# Altium footprint library CircuitosIntegrados.PcbLib: 19 footprints (part 1 of 2)
Each footprint in its own frame and in the unit in brackets; x right, y up, seen from the top. Pads: shape width x height; smd on the part's side, far side on the other; paste and mask are expansions set on the pad; w line width, h text height; cw(c..) or ccw(c..) is an arc to the next point about the centre after c.
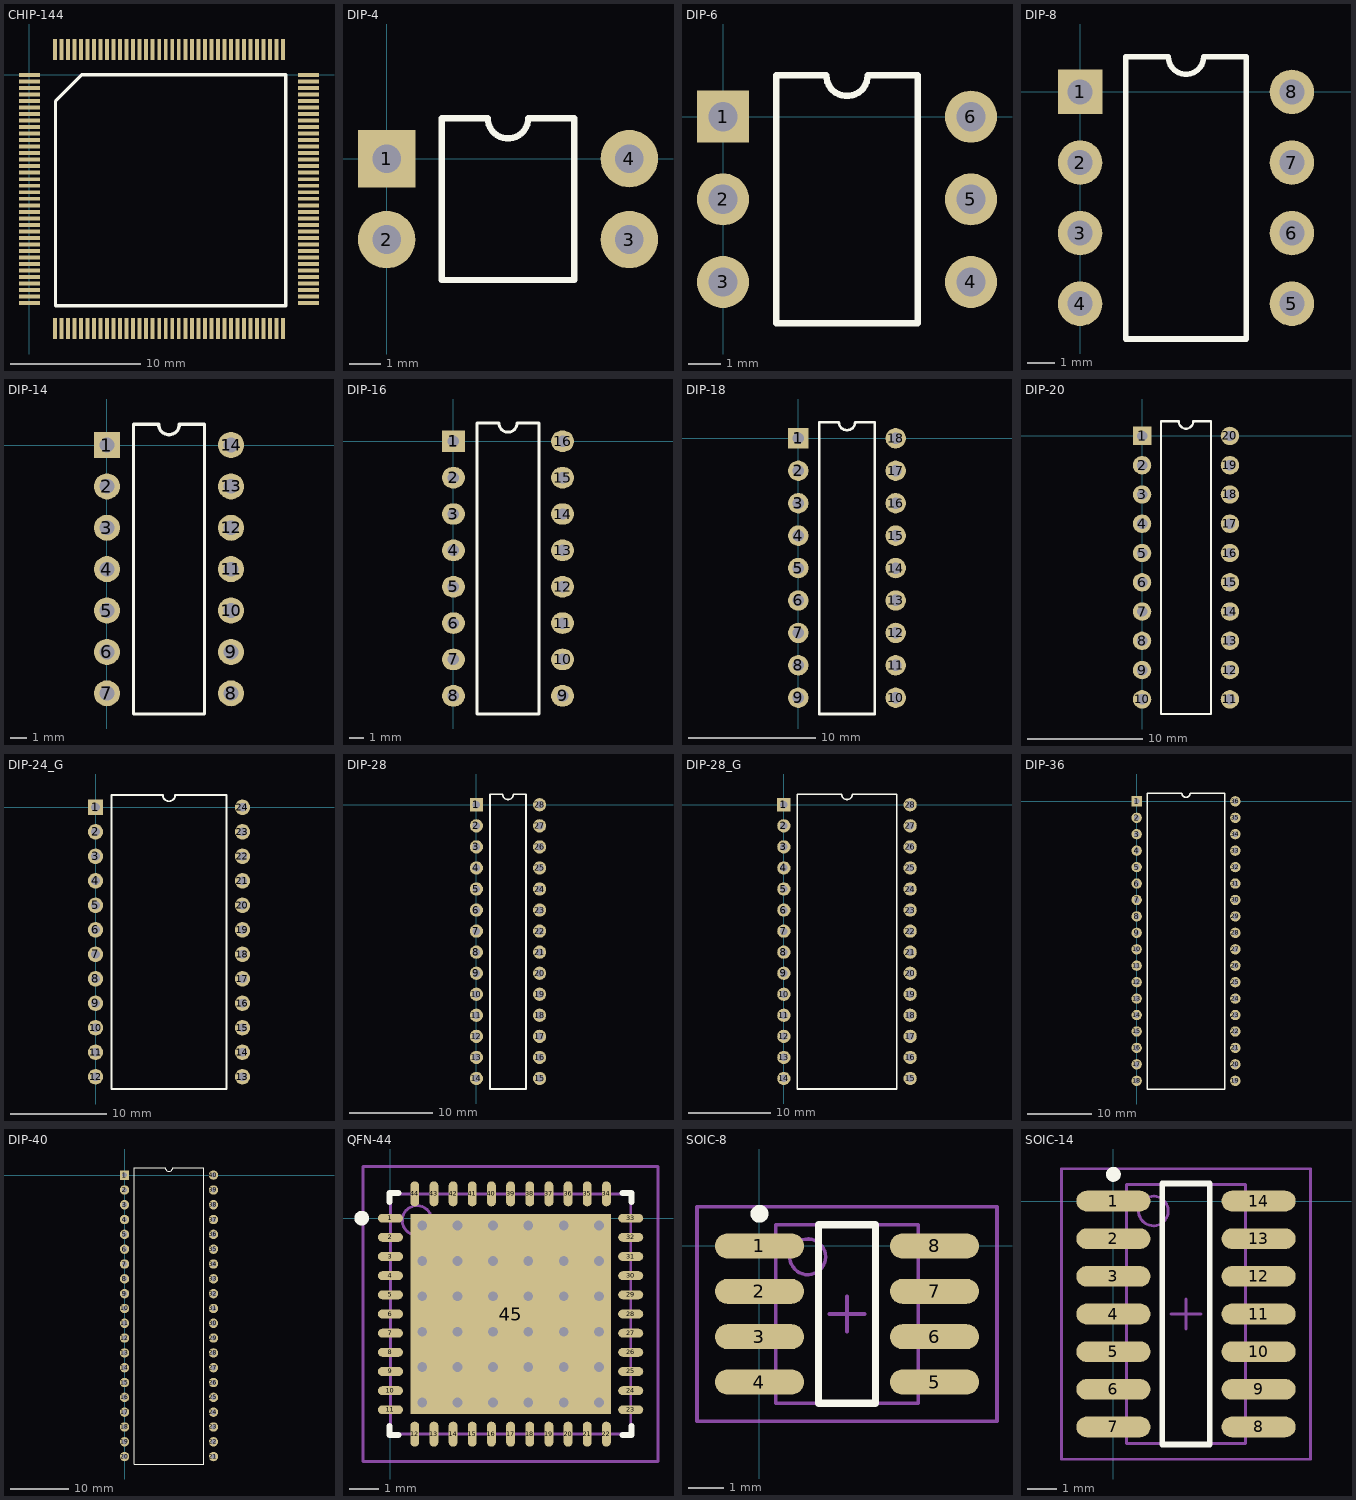
[diagram p0: the footprints below, top view; thin cyan lines are the x and y axes]

## CHIP-144 [mm]
pads (144):
  rect 1.6x0.3 smd: 1(0,0) 2(0,-0.5) 3(0,-1) 4(0,-1.5) 5(0,-2) 6(0,-2.5) 7(0,-3) 8(0,-3.5) 9(0,-4) 10(0,-4.5) 11(0,-5) 12(0,-5.5) 13(0,-6) 14(0,-6.5) 15(0,-7) 16(0,-7.5) 17(0,-8) 18(0,-8.5) 19(0,-9) 20(0,-9.5) 21(0,-10) 22(0,-10.5) 23(0,-11) 24(0,-11.5) 25(0,-12) 26(0,-12.5) 27(0,-13) 28(0,-13.5) 29(0,-14) 30(0,-14.5) 31(0,-15) 32(0,-15.5) 33(0,-16) 34(0,-16.5) 35(0,-17) 36(0,-17.5) 73(21.4,-17.5) 74(21.4,-17) 75(21.4,-16.5) 76(21.4,-16) 77(21.4,-15.5) 78(21.4,-15) 79(21.4,-14.5) 80(21.4,-14) 81(21.4,-13.5) 82(21.4,-13) 83(21.4,-12.5) 84(21.4,-12) 85(21.4,-11.5) 86(21.4,-11) 87(21.4,-10.5) 88(21.4,-10) 89(21.4,-9.5) 90(21.4,-9) 91(21.4,-8.5) 92(21.4,-8) 93(21.4,-7.5) 94(21.4,-7) 95(21.4,-6.5) 96(21.4,-6) 97(21.4,-5.5) 98(21.4,-5) 99(21.4,-4.5) 100(21.4,-4) 101(21.4,-3.5) 102(21.4,-3) 103(21.4,-2.5) 104(21.4,-2) 105(21.4,-1.5) 106(21.4,-1) 107(21.4,-0.5) 108(21.4,0)
  rect 0.3x1.6 smd: 37(1.95,-19.45) 38(2.45,-19.45) 39(2.95,-19.45) 40(3.45,-19.45) 41(3.95,-19.45) 42(4.45,-19.45) 43(4.95,-19.45) 44(5.45,-19.45) 45(5.95,-19.45) 46(6.45,-19.45) 47(6.95,-19.45) 48(7.45,-19.45) 49(7.95,-19.45) 50(8.45,-19.45) 51(8.95,-19.45) 52(9.45,-19.45) 53(9.95,-19.45) 54(10.45,-19.45) 55(10.95,-19.45) 56(11.45,-19.45) 57(11.95,-19.45) 58(12.45,-19.45) 59(12.95,-19.45) 60(13.45,-19.45) 61(13.95,-19.45) 62(14.45,-19.45) 63(14.95,-19.45) 64(15.45,-19.45) 65(15.95,-19.45) 66(16.45,-19.45) 67(16.95,-19.45) 68(17.45,-19.45) 69(17.95,-19.45) 70(18.45,-19.45) 71(18.95,-19.45) 72(19.45,-19.45) 109(19.45,1.95) 110(18.95,1.95) 111(18.45,1.95) 112(17.95,1.95) 113(17.45,1.95) 114(16.95,1.95) 115(16.45,1.95) 116(15.95,1.95) 117(15.45,1.95) 118(14.95,1.95) 119(14.45,1.95) 120(13.95,1.95) 121(13.45,1.95) 122(12.95,1.95) 123(12.45,1.95) 124(11.95,1.95) 125(11.45,1.95) 126(10.95,1.95) 127(10.45,1.95) 128(9.95,1.95) 129(9.45,1.95) 130(8.95,1.95) 131(8.45,1.95) 132(7.95,1.95) 133(7.45,1.95) 134(6.95,1.95) 135(6.45,1.95) 136(5.95,1.95) 137(5.45,1.95) 138(4.95,1.95) 139(4.45,1.95) 140(3.95,1.95) 141(3.45,1.95) 142(2.95,1.95) 143(2.45,1.95) 144(1.95,1.95)
Top Overlay:
  lines w0.254: 2,-17.7 19.65,-17.7 19.65,0 4,0 2,-2 2,-17.7

## DIP-4 [mm]
pads (4):
  rect 1.8x1.8 hole 0.9: 1(0,0)
  round 1.8 hole 0.9: 2(0,-2.54) 3(7.62,-2.54) 4(7.62,0)
Top Overlay:
  lines w0.2: 1.735,-3.81 1.735,1.27 3.175,1.27 ccw(c3.81,1.27) 4.445,1.27 5.885,1.27 5.885,-3.81 1.735,-3.81
3D body "dip-4.step": height 1.99, standoff -3.3, extent -0.09,-4.37 7.71,1.83

## DIP-6 [mm]
pads (6):
  rect 1.6x1.6 hole 0.9: 1(0,0)
  round 1.6 hole 0.9: 2(0,-2.54) 3(0,-5.08) 4(7.62,-5.08) 5(7.62,-2.54) 6(7.62,0)
Top Overlay:
  lines w0.2: 1.635,-6.35 1.635,1.27 3.175,1.27 ccw(c3.81,1.27) 4.445,1.27 5.985,1.27 5.985,-6.35 1.635,-6.35
3D body "dip-6.step": height 1.99, standoff -3.3, extent -0.09,-7.24 7.71,2.16

## DIP-8 [mm]
pads (8):
  rect 1.6x1.6 hole 0.9: 1(0,0)
  round 1.6 hole 0.9: 2(0,-2.54) 3(0,-5.08) 4(0,-7.62) 5(7.62,-7.62) 6(7.62,-5.08) 7(7.62,-2.54) 8(7.62,0)
Top Overlay:
  lines w0.2: 1.635,-8.89 5.985,-8.89 5.985,1.27 4.445,1.27 cw(c3.81,1.27) 3.175,1.27 1.635,1.27 1.635,-8.89
3D body "dip-8.step": height 3.5, standoff -2.7, extent -0.15,-8.91 7.77,1.29

## DIP-14 [mm]
pads (14):
  rect 1.6x1.6 hole 0.9: 1(0,0)
  round 1.6 hole 0.9: 2(0,-2.54) 3(0,-5.08) 4(0,-7.62) 5(0,-10.16) 6(0,-12.7) 7(0,-15.24) 8(7.62,-15.24) 9(7.62,-12.7) 10(7.62,-10.16) 11(7.62,-7.62) 12(7.62,-5.08) 13(7.62,-2.54) 14(7.62,0)
Top Overlay:
  lines w0.2: 1.635,-16.51 5.985,-16.51 5.985,1.27 4.445,1.27 cw(c3.81,1.27) 3.175,1.27 1.635,1.27 1.635,-16.51
3D body "dip-14.step": height 1.9, standoff -3.5, extent -0.15,-17.27 7.77,2.03

## DIP-16 [mm]
pads (16):
  rect 1.6x1.5 hole 0.8: 1(0,0)
  oval 1.6x1.5 hole 0.8: 2(0,-2.54) 3(0,-5.08) 4(0,-7.62) 5(0,-10.16) 6(0,-12.7) 7(0,-15.24) 8(0,-17.78) 9(7.62,-17.78) 10(7.62,-15.24) 11(7.62,-12.7) 12(7.62,-10.16) 13(7.62,-7.62) 14(7.62,-5.08) 15(7.62,-2.54) 16(7.62,0)
Top Overlay:
  lines w0.2: 1.635,-19.05 1.635,1.27 3.175,1.27 ccw(c3.81,1.27) 4.445,1.27 5.985,1.27 5.985,-19.05 1.635,-19.05
3D body "dip-16.step": height 1.8, standoff -3.6, extent -0.15,-19.14 7.77,1.36

## DIP-18 [mm]
pads (18):
  rect 1.6x1.6 hole 0.9: 1(0,0)
  round 1.6 hole 0.9: 2(0,-2.54) 3(0,-5.08) 4(0,-7.62) 5(0,-10.16) 6(0,-12.7) 7(0,-15.24) 8(0,-17.78) 9(0,-20.32) 10(7.62,-20.32) 11(7.62,-17.78) 12(7.62,-15.24) 13(7.62,-12.7) 14(7.62,-10.16) 15(7.62,-7.62) 16(7.62,-5.08) 17(7.62,-2.54) 18(7.62,0)
Top Overlay:
  lines w0.2: 1.635,-21.59 1.635,1.27 3.175,1.27 ccw(c3.81,1.27) 4.445,1.27 5.985,1.27 5.985,-21.59 1.635,-21.59
3D body "dip-18.step": height 1.8, standoff -3.6, extent -0.15,-21.56 7.77,1.24

## DIP-20 [mm]
pads (20):
  rect 1.6x1.6 hole 0.9: 1(0,0)
  round 1.6 hole 0.9: 2(0,-2.54) 3(0,-5.08) 4(0,-7.62) 5(0,-10.16) 6(0,-12.7) 7(0,-15.24) 8(0,-17.78) 9(0,-20.32) 10(0,-22.86) 11(7.62,-22.86) 12(7.62,-20.32) 13(7.62,-17.78) 14(7.62,-15.24) 15(7.62,-12.7) 16(7.62,-10.16) 17(7.62,-7.62) 18(7.62,-5.08) 19(7.62,-2.54) 20(7.62,0)
Top Overlay:
  lines w0.2: 1.635,-24.13 5.985,-24.13 5.985,1.27 4.445,1.27 cw(c3.81,1.27) 3.175,1.27 1.635,1.27 1.635,-24.13
3D body "dip-20.step": height 1.85, standoff -3.55, extent -0.15,-24.43 7.77,1.57

## DIP-24_G [mm]
pads (24):
  rect 1.6x1.6 hole 0.9: 1(0,0)
  round 1.6 hole 0.9: 2(0,-2.54) 3(0,-5.08) 4(0,-7.62) 5(0,-10.16) 6(0,-12.7) 7(0,-15.24) 8(0,-17.78) 9(0,-20.32) 10(0,-22.86) 11(0,-25.4) 12(0,-27.94) 13(15.24,-27.94) 14(15.24,-25.4) 15(15.24,-22.86) 16(15.24,-20.32) 17(15.24,-17.78) 18(15.24,-15.24) 19(15.24,-12.7) 20(15.24,-10.16) 21(15.24,-7.62) 22(15.24,-5.08) 23(15.24,-2.54) 24(15.24,0)
Top Overlay:
  lines w0.2: 1.635,-29.21 1.635,1.27 6.985,1.27 ccw(c7.62,1.27) 8.255,1.27 13.605,1.27 13.605,-29.21 1.635,-29.21
3D body "dip-24_600mil.step": height 1.9, standoff -3.5, extent -0.15,-29.57 15.45,2.83

## DIP-28 [mm]
pads (28):
  rect 1.6x1.6 hole 0.9: 1(0,0)
  round 1.6 hole 0.9: 2(0,-2.54) 3(0,-5.08) 4(0,-7.62) 5(0,-10.16) 6(0,-12.7) 7(0,-15.24) 8(0,-17.78) 9(0,-20.32) 10(0,-22.86) 11(0,-25.4) 12(0,-27.94) 13(0,-30.48) 14(0,-33.02) 15(7.62,-33.02) 16(7.62,-30.48) 17(7.62,-27.94) 18(7.62,-25.4) 19(7.62,-22.86) 20(7.62,-20.32) 21(7.62,-17.78) 22(7.62,-15.24) 23(7.62,-12.7) 24(7.62,-10.16) 25(7.62,-7.62) 26(7.62,-5.08) 27(7.62,-2.54) 28(7.62,0)
Top Overlay:
  lines w0.2: 1.635,-34.29 5.985,-34.29 5.985,1.27 4.445,1.27 cw(c3.81,1.27) 3.175,1.27 1.635,1.27 1.635,-34.29
3D body "dip-28.step": height 2.7, standoff -2.7, extent -0.15,-34.51 7.77,1.49

## DIP-28_G [mm]
pads (28):
  rect 1.6x1.6 hole 0.9: 1(0,0)
  round 1.6 hole 0.9: 2(0,-2.54) 3(0,-5.08) 4(0,-7.62) 5(0,-10.16) 6(0,-12.7) 7(0,-15.24) 8(0,-17.78) 9(0,-20.32) 10(0,-22.86) 11(0,-25.4) 12(0,-27.94) 13(0,-30.48) 14(0,-33.02) 15(15.24,-33.02) 16(15.24,-30.48) 17(15.24,-27.94) 18(15.24,-25.4) 19(15.24,-22.86) 20(15.24,-20.32) 21(15.24,-17.78) 22(15.24,-15.24) 23(15.24,-12.7) 24(15.24,-10.16) 25(15.24,-7.62) 26(15.24,-5.08) 27(15.24,-2.54) 28(15.24,0)
Top Overlay:
  lines w0.2: 1.635,-34.29 1.635,1.27 6.985,1.27 ccw(c7.62,1.27) 8.255,1.27 13.605,1.27 13.605,-34.29 1.635,-34.29
3D body "dip-28_600mil.step": height 1.9, standoff -3.5, extent -0.18,-35.11 15.42,2.09

## DIP-36 [mm]
pads (36):
  rect 1.6x1.6 hole 0.9: 1(0,0)
  round 1.6 hole 0.9: 2(0,-2.54) 3(0,-5.08) 4(0,-7.62) 5(0,-10.16) 6(0,-12.7) 7(0,-15.24) 8(0,-17.78) 9(0,-20.32) 10(0,-22.86) 11(0,-25.4) 12(0,-27.94) 13(0,-30.48) 14(0,-33.02) 15(0,-35.56) 16(0,-38.1) 17(0,-40.64) 18(0,-43.18) 19(15.24,-43.18) 20(15.24,-40.64) 21(15.24,-38.1) 22(15.24,-35.56) 23(15.24,-33.02) 24(15.24,-30.48) 25(15.24,-27.94) 26(15.24,-25.4) 27(15.24,-22.86) 28(15.24,-20.32) 29(15.24,-17.78) 30(15.24,-15.24) 31(15.24,-12.7) 32(15.24,-10.16) 33(15.24,-7.62) 34(15.24,-5.08) 35(15.24,-2.54) 36(15.24,0)
Top Overlay:
  lines w0.2: 1.635,-44.45 1.635,1.27 6.985,1.27 ccw(c7.62,1.27) 8.255,1.27 13.605,1.27 13.605,-44.45 1.635,-44.45
3D body "dip-36_600mil.step": height 1.9, standoff -3.5, extent -0.18,-44.74 15.42,1.56

## DIP-40 [mm]
pads (40):
  rect 1.6x1.6 hole 0.9: 1(0,0)
  round 1.6 hole 0.9: 2(0,-2.54) 3(0,-5.08) 4(0,-7.62) 5(0,-10.16) 6(0,-12.7) 7(0,-15.24) 8(0,-17.78) 9(0,-20.32) 10(0,-22.86) 11(0,-25.4) 12(0,-27.94) 13(0,-30.48) 14(0,-33.02) 15(0,-35.56) 16(0,-38.1) 17(0,-40.64) 18(0,-43.18) 19(0,-45.72) 20(0,-48.26) 21(15.24,-48.26) 22(15.24,-45.72) 23(15.24,-43.18) 24(15.24,-40.64) 25(15.24,-38.1) 26(15.24,-35.56) 27(15.24,-33.02) 28(15.24,-30.48) 29(15.24,-27.94) 30(15.24,-25.4) 31(15.24,-22.86) 32(15.24,-20.32) 33(15.24,-17.78) 34(15.24,-15.24) 35(15.24,-12.7) 36(15.24,-10.16) 37(15.24,-7.62) 38(15.24,-5.08) 39(15.24,-2.54) 40(15.24,0)
Top Overlay:
  lines w0.2: 1.635,-49.53 1.635,1.27 6.985,1.27 ccw(c7.62,1.27) 8.255,1.27 13.605,1.27 13.605,-49.53 1.635,-49.53
3D body "dip-40_600mil.step": height 2.7, standoff -2.7, extent -0.18,-49.63 15.42,1.37

## QFN-44 [mm] "QFN, 44-Leads, Body 8x8 mm, Pitch 0.65mm, IPC Low Density"
height 1
pads (45):
  oval 0.85x0.3 smd: 1(0,0) 2(0,-0.65) 3(0,-1.3) 4(0,-1.95) 5(0,-2.6) 6(0,-3.25) 7(0,-3.9) 8(0,-4.55) 9(0,-5.2) 10(0,-5.85) 11(0,-6.5) 23(8.15,-6.5) 24(8.15,-5.85) 25(8.15,-5.2) 26(8.15,-4.55) 27(8.15,-3.9) 28(8.15,-3.25) 29(8.15,-2.6) 30(8.15,-1.95) 31(8.15,-1.3) 32(8.15,-0.65) 33(8.15,0)
  oval 0.3x0.85 smd: 12(0.825,-7.325) 13(1.475,-7.325) 14(2.125,-7.325) 15(2.775,-7.325) 16(3.425,-7.325) 17(4.075,-7.325) 18(4.725,-7.325) 19(5.375,-7.325) 20(6.025,-7.325) 21(6.675,-7.325) 22(7.325,-7.325) 34(7.325,0.825) 35(6.675,0.825) 36(6.025,0.825) 37(5.375,0.825) 38(4.725,0.825) 39(4.075,0.825) 40(3.425,0.825) 41(2.775,0.825) 42(2.125,0.825) 43(1.475,0.825) 44(0.825,0.825)
  rect 6.8x6.8 smd: 45(4.075,-3.25)
via 7.075,-6.25 diameter 0.66 hole 0.33
via 5.875,-6.25 diameter 0.66 hole 0.33
via 4.675,-6.25 diameter 0.66 hole 0.33
via 3.475,-6.25 diameter 0.66 hole 0.33
via 2.275,-6.25 diameter 0.66 hole 0.33
via 1.075,-6.25 diameter 0.66 hole 0.33
via 7.075,-5.05 diameter 0.66 hole 0.33
via 5.875,-5.05 diameter 0.66 hole 0.33
via 4.675,-5.05 diameter 0.66 hole 0.33
via 3.475,-5.05 diameter 0.66 hole 0.33
via 2.275,-5.05 diameter 0.66 hole 0.33
via 1.075,-5.05 diameter 0.66 hole 0.33
via 7.075,-3.85 diameter 0.66 hole 0.33
via 5.875,-3.85 diameter 0.66 hole 0.33
via 4.675,-3.85 diameter 0.66 hole 0.33
via 3.475,-3.85 diameter 0.66 hole 0.33
via 2.275,-3.85 diameter 0.66 hole 0.33
via 1.075,-3.85 diameter 0.66 hole 0.33
via 7.075,-2.65 diameter 0.66 hole 0.33
via 5.875,-2.65 diameter 0.66 hole 0.33
via 4.675,-2.65 diameter 0.66 hole 0.33
via 3.475,-2.65 diameter 0.66 hole 0.33
via 2.275,-2.65 diameter 0.66 hole 0.33
via 1.075,-2.65 diameter 0.66 hole 0.33
via 7.075,-1.45 diameter 0.66 hole 0.33
via 5.875,-1.45 diameter 0.66 hole 0.33
via 4.675,-1.45 diameter 0.66 hole 0.33
via 3.475,-1.45 diameter 0.66 hole 0.33
via 2.275,-1.45 diameter 0.66 hole 0.33
via 1.075,-1.45 diameter 0.66 hole 0.33
via 7.075,-0.25 diameter 0.66 hole 0.33
via 5.875,-0.25 diameter 0.66 hole 0.33
via 4.675,-0.25 diameter 0.66 hole 0.33
via 3.475,-0.25 diameter 0.66 hole 0.33
via 2.275,-0.25 diameter 0.66 hole 0.33
via 1.075,-0.25 diameter 0.66 hole 0.33
Top Overlay:
  circle w0.25: c-0.975,0 r0.125
  lines w0.2: -0.025,-7.05 -0.025,-7.35 0.275,-7.35 ; -0.025,0.55 -0.025,0.85 0.275,0.85 ; 7.875,-7.35 8.175,-7.35 8.175,-7.05 ; 7.875,0.85 8.175,0.85 8.175,0.55
Mechanical 13:
  circle w0.1: c0.9,-0.075 r0.5
  lines w0.1: 0,-7.325 8.15,-7.325 8.15,0.825 0,0.825 0,-7.325
Mechanical 15:
  lines w0.1: 3.575,-3.25 4.575,-3.25 ; 4.075,-3.75 4.075,-2.75 ; -0.925,-8.25 9.075,-8.25 9.075,1.75 -0.925,1.75 -0.925,-8.25
3D body: height 1, standoff 0, extent 0,-7.325 8.15,0.825

## SOIC-8 [mm]
pads (8):
  oval 2.5x0.7 smd: 1(0,0) 2(0,-1.27) 3(0,-2.54) 4(0,-3.81) 5(4.9,-3.81) 6(4.9,-2.54) 7(4.9,-1.27) 8(4.9,0)
Top Overlay:
  circle w0.25: c0,0.9 r0.125
  lines w0.2: 1.65,-4.405 1.65,0.595 3.25,0.595 3.25,-4.405 1.65,-4.405
Mechanical 13:
  circle w0.1: c1.35,-0.305 r0.5
  lines w0.1: 0.45,-4.405 0.45,0.595 4.45,0.595 4.45,-4.405 0.45,-4.405
Mechanical 15:
  lines w0.1: 1.95,-1.905 2.95,-1.905 ; 2.45,-2.405 2.45,-1.405 ; -1.75,-4.905 -1.75,1.095 6.65,1.095 6.65,-4.905 -1.75,-4.905
3D body: height 1.75, standoff 0, extent 0.45,-4.405 4.45,0.595

## SOIC-14 [mm]
pads (14):
  oval 2.5x0.7 smd: 1(0,0) 2(0,-1.27) 3(0,-2.54) 4(0,-3.81) 5(0,-5.08) 6(0,-6.35) 7(0,-7.62) 8(4.9,-7.62) 9(4.9,-6.35) 10(4.9,-5.08) 11(4.9,-3.81) 12(4.9,-2.54) 13(4.9,-1.27) 14(4.9,0)
Top Overlay:
  circle w0.25: c0,0.9 r0.125
  lines w0.2: 1.65,-8.21 3.25,-8.21 3.25,0.59 1.65,0.59 1.65,-8.21
Mechanical 13:
  circle w0.1: c1.35,-0.335 r0.5
  lines w0.1: 0.45,-8.185 4.45,-8.185 4.45,0.565 0.45,0.565 0.45,-8.185
Mechanical 15:
  lines w0.1: 1.95,-3.81 2.95,-3.81 ; 2.45,-4.31 2.45,-3.31 ; -1.75,-8.71 6.65,-8.71 6.65,1.09 -1.75,1.09 -1.75,-8.71
3D body: height 1.75, standoff 0, extent 0.45,-8.185 4.45,0.565